# Altium footprint library chipfc_libs.PCBLIB: 315 footprints (part 8 of 20)
Each footprint in its own frame and in the unit in brackets; x right, y up, seen from the top. Pads: shape width x height; smd on the part's side, far side on the other; paste and mask are expansions set on the pad; w line width, h text height; cw(c..) or ccw(c..) is an arc to the next point about the centre after c.
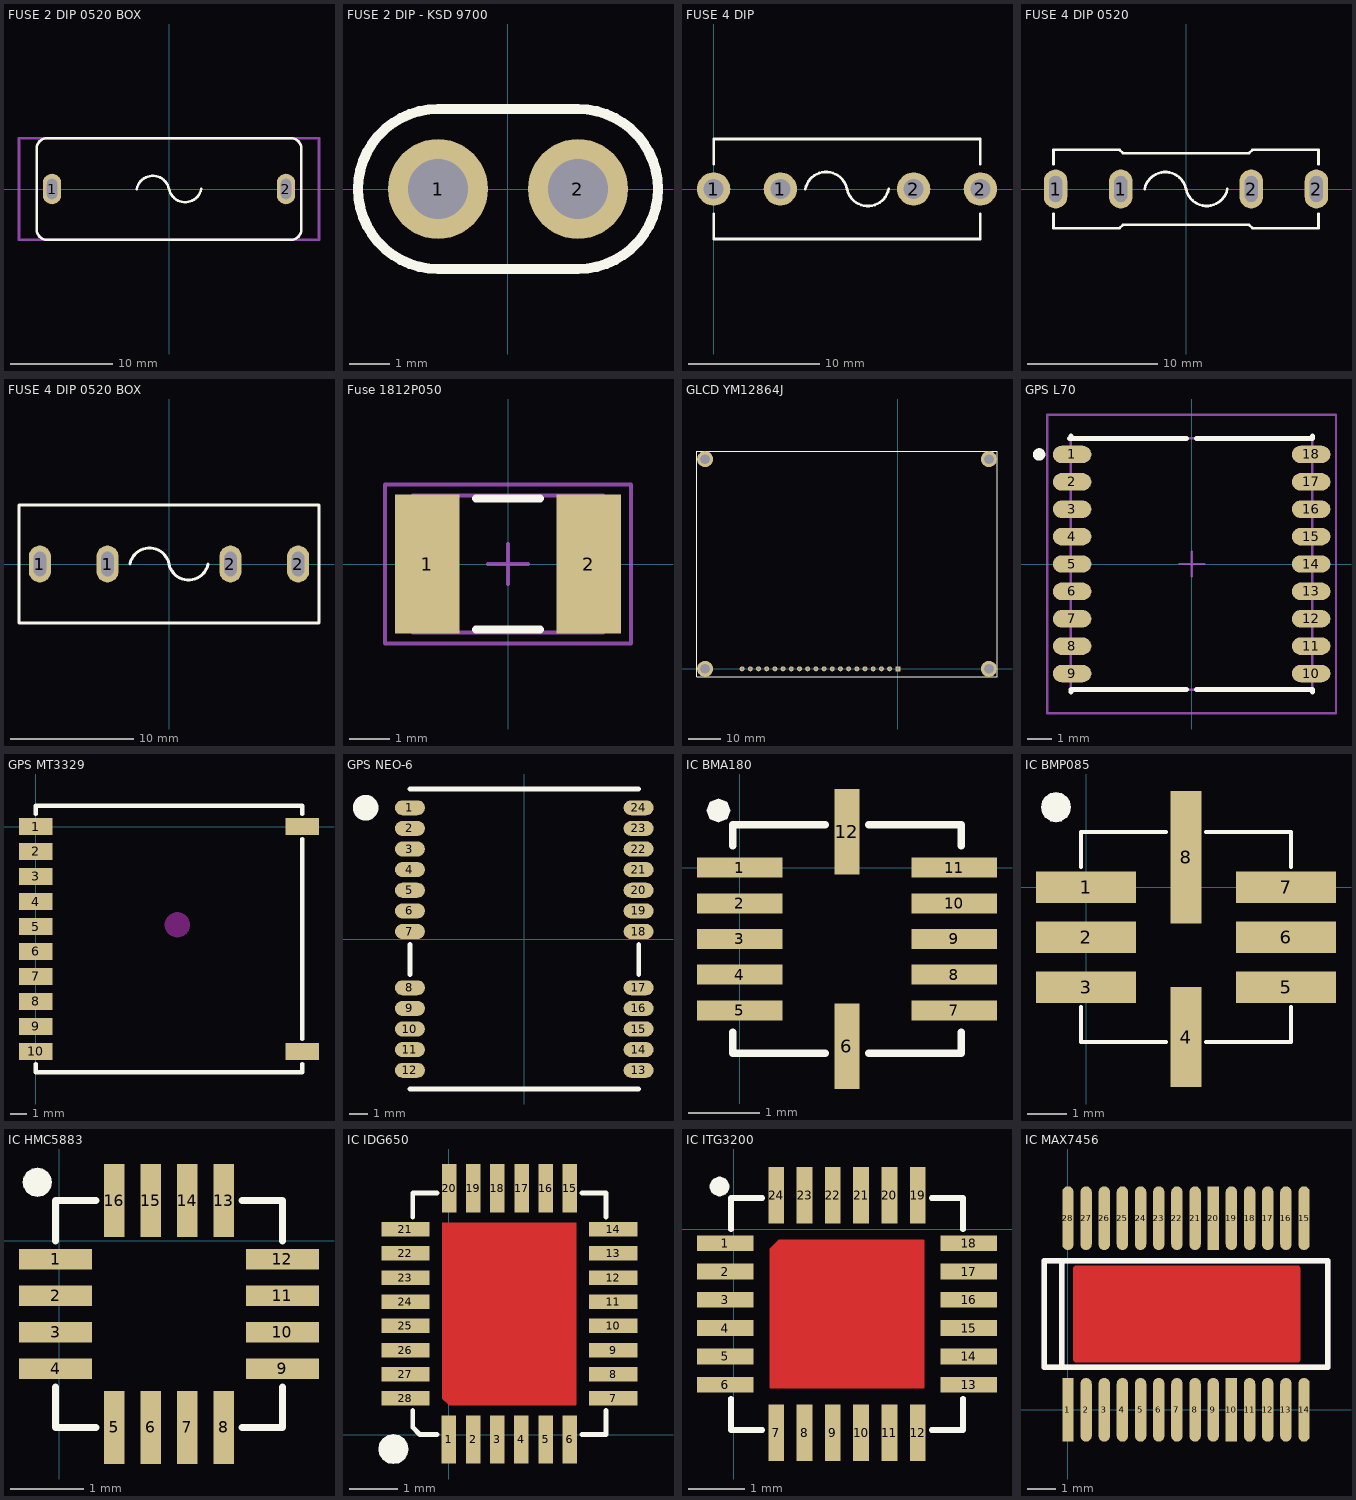
[diagram p7: the footprints below, top view; thin cyan lines are the x and y axes]

## FUSE 2 DIP 0520 BOX [mm] "5mm x 20mm"
pads (2):
  oval 1.8x3 hole 1 slot 2 at 90 deg: 1(-11.5,0) 2(11.5,0)
Top Overlay:
  lines w0.254: -3.175,0 cw(c-1.587,-0.318) 0,0 ccw(c1.587,0.318) 3.175,0 ; -13,-4 ccw(c-12,-4) -12,-5 12,-5 ccw(c12,-4) 13,-4 13,4 ccw(c12,4) 12,5 -12,5 ccw(c-12,4) -13,4 -13,-4
Mechanical 1:
  lines w0.254: -14.75,-5 -14.75,5 14.75,5 14.75,-5 -14.75,-5
3D body "User Library-Fuse_Holder_FH-101-1.STEP": height 10.75, standoff -4.25, extent -12.15,-4.8 12.15,4.8

## FUSE 2 DIP - KSD 9700 [mm]
pads (2):
  round 2.5 hole 1.5: 1(-1.75,0) 2(1.75,0)
Top Overlay:
  lines w0.254: -1.75,-2 cw(c-1.75,0) -1.75,2 1.75,2 cw(c1.75,0) 1.75,-2 -1.75,-2

## FUSE 4 DIP [mil]
pads (4):
  round 100 hole 60: 1(0,0) 1(200,0) 2(600,0) 2(800,0)
Top Overlay:
  lines w8: 0,-75 0,-150 800,-150 800,-75 ; 0,75 0,150 800,150 800,75 ; 275,0 cw(c337.5,-12.5) 400,0 ccw(c462.5,12.5) 525,0
3D body "User Library-Fuse Leg_2009.step": height 377.88, standoff -129.94, extent -15,-121.85 225,121.85
3D body "User Library-Fuse Leg_2009.step": height 377.88, standoff -129.94, extent 575,-121.85 815,121.85
3D body "User Library-Fuse Small 1A.step": height 350.39, standoff 149.61, extent 12.2,-100.79 787.8,100

## FUSE 4 DIP 0520 [mm] "5mm x 20mm"
pads (4):
  oval 1.8x3 hole 1 slot 2 at 90 deg: 1(-10,0) 1(-5,0) 2(5,0) 2(10,0)
Top Overlay:
  lines w0.203: -10.16,-1.905 -10.16,-3 -5.08,-3 -4.83,-2.75 4.83,-2.75 5.08,-3 10.16,-3 10.16,-1.905 ; -10.16,1.905 -10.16,3 -5.08,3 -4.83,2.75 4.83,2.75 5.08,3 10.16,3 10.16,1.905 ; -3.175,0 cw(c-1.587,-0.318) 0,0 ccw(c1.587,0.318) 3.175,0
3D body "User Library-Fuse Small 1A.step": height 8.9, standoff 3.8, extent -9.85,-2.56 9.85,2.54
3D body "User Library-Fuse Leg_2009.step": height 9.6, standoff -3.3, extent 4.445,-3.095 10.541,3.095
3D body "User Library-Fuse Leg_2009.step": height 9.6, standoff -3.3, extent -10.541,-3.095 -4.445,3.095

## FUSE 4 DIP 0520 BOX [mm] "5mm x 20mm"
pads (4):
  oval 1.8x3 hole 1 slot 2 at 90 deg: 1(-10.5,0) 1(-5,0) 2(5,0) 2(10.5,0)
Top Overlay:
  lines w0.254: -3.175,0 cw(c-1.587,-0.318) 0,0 ccw(c1.587,0.318) 3.175,0 ; -12.2,-4.8 12.2,-4.8 12.2,4.8 -12.2,4.8 -12.2,-4.8
3D body "User Library-Fuse_Holder_FH-101-1.STEP": height 10.75, standoff -4.25, extent -12.15,-4.8 12.15,4.8

## Fuse 1812P050 [mm] "Fuse 1812P050, 2-Leads, Body 4.5x3.2mm, IPC Medium Density"
height 0.75
pads (2):
  rect 1.6x3.45 smd: 1(-2,0) 2(2,0)
Top Overlay:
  lines w0.2: -0.8,-1.625 0.8,-1.625 ; -0.8,1.625 0.8,1.625
Mechanical 13:
  lines w0.1: -2.365,-1.705 -2.365,1.705 2.365,1.705 2.365,-1.705 -2.365,-1.705
Mechanical 15:
  lines w0.1: -0.5,0 0.5,0 ; 0,-0.5 0,0.5 ; -3.05,-1.975 -3.05,1.975 3.05,1.975 3.05,-1.975 -3.05,-1.975
3D body "User Library-1812L.step": height 1.34, standoff 0, extent -2.33,-1.7 2.4,1.71

## GLCD YM12864J [mil]
pads (24):
  rect 60x60 / inner round 60 / far side rect 60x80 hole 31: 1(0,0)
  round 60 / inner round 60 / far side oval 60x80 hole 31: 2(-100,0) 3(-200,0) 4(-300,0) 5(-400,0) 6(-500,0) 7(-600,0) 8(-700,0) 9(-800,0) 10(-900,0) 11(-1000,0) 12(-1100,0) 13(-1200,0) 14(-1300,0) 15(-1400,0) 16(-1500,0) 17(-1600,0) 18(-1700,0) 19(-1800,0) 20(-1900,0)
  round 196.83 / inner round 60 / far side round 196.83 hole 118.1: HOLD1(-2352.15,0) HOLD2(-2352.15,2558.83) HOLD3(1112.1,2558.83) HOLD4(1112.1,0)
Top Overlay:
  lines w10: -2450.57,-98.42 1210.52,-98.42 1210.52,2657.25 -2450.57,2657.25 -2450.57,-98.42
  text ".Comment" at -52.33,-118.13 h37.5
  text ".Designator" at -61.45,56.88 h37.5

## GPS L70 [mm] "LCC, 18-Pins, Body 9.7x10.1mm (max), Pitch 1.10mm, IPC Medium Density"
height 2.5
pads (18):
  oval 1.55x0.7 smd: 1(-4.8,4.4) 2(-4.8,3.3) 3(-4.8,2.2) 4(-4.8,1.1) 5(-4.8,0) 6(-4.8,-1.1) 7(-4.8,-2.2) 8(-4.8,-3.3) 9(-4.8,-4.4) 10(4.8,-4.4) 11(4.8,-3.3) 12(4.8,-2.2) 13(4.8,-1.1) 14(4.8,0) 15(4.8,1.1) 16(4.8,2.2) 17(4.8,3.3) 18(4.8,4.4)
Top Overlay:
  circle w0.25: c-6.125,4.4 r0.125
  lines w0.2: -4.85,-5.15 -4.85,-5.05 -0.2,-5.05 ; -4.85,5.15 -4.85,5.1 -4.9,5.05 -0.2,5.05 ; 0.2,-5.05 4.85,-5.05 4.85,-5.15 ; 0.2,5.05 4.85,5.05 4.85,5.15
Mechanical 13:
  lines w0.1: -4.9,5.05 4.85,5.05 4.85,-5.05 -4.85,-5.05 -4.85,5.1 -4.9,5.05
Mechanical 15:
  lines w0.1: -0.5,0 0.5,0 ; 0,-0.5 0,0.5 ; -5.8,-6 -5.8,6 5.8,6 5.8,-6 -5.8,-6
3D body "User Library-QUECTEL L70.step": height 2.52, standoff 0, extent -4.85,-5.05 4.85,5.05

## GPS MT3329 [mm] "66-channel GPS Engine Board Antenna Module with MTK Chipset MEDIATEK-3329"
height 6
pads (13):
  rect 2x1 smd: 1(0,0) 2(0,-1.5) 3(0,-3) 4(0,-4.5) 5(0,-6) 6(0,-7.5) 7(0,-9) 8(0,-10.5) 9(0,-12) 10(0,-13.5) ""(16,-13.5) ""(16,0)
  round 1.524 on Keep-Out: ""(8.5,-5.9)
Top Overlay:
  lines w0.254: 0,-14.25 0,-14.75 16,-14.75 16,-14.25 ; 0,0.75 0,1.25 16,1.25 16,0.75 ; 16,-12.75 16,-0.75
3D body "User Library-GPS.step": height 6.49, standoff -0.01, extent -0.01,-14.75 16.01,1.25

## GPS NEO-6 [mm]
pads (24):
  oval 1.6x0.8 smd: 1(-6.1,7) 2(-6.1,5.9) 3(-6.1,4.8) 4(-6.1,3.7) 5(-6.1,2.6) 6(-6.1,1.5) 7(-6.1,0.4) 8(-6.1,-2.6) 9(-6.1,-3.7) 10(-6.1,-4.8) 11(-6.1,-5.9) 12(-6.1,-7) 13(6.1,-7) 14(6.1,-5.9) 15(6.1,-4.8) 16(6.1,-3.7) 17(6.1,-2.6) 18(6.1,0.4) 19(6.1,1.5) 20(6.1,2.6) 21(6.1,3.7) 22(6.1,4.8) 23(6.1,5.9) 24(6.1,7)
Top Overlay:
  circle w1.016: c-8.465,7 r0.175
  lines w0.254: -6.1,-8 6.1,-8 ; -6.1,-1.9 -6.1,-0.3 ; -6.1,8 6.1,8 ; 6.1,-1.9 6.1,-0.3
3D body "User Library-L20.step": height 3.3, standoff 0, extent -6.104,-8 6.096,8

## IC BMA180 [mil]
pads (12):
  rect 47.23x11 smd: 1(0,0) 2(0,-19.68) 3(0,-39.37) 4(0,-59.05) 5(0,-78.75) 7(118.12,-78.75) 8(118.12,-59.05) 9(118.12,-39.37) 10(118.12,-19.68) 11(118.12,0)
  rect 14x47.23 smd: 6(59.05,-98.43) 12(59.05,19.68)
Top Overlay:
  region: -7.33,36.27 -7.03,35.97 -5.27,31.71 -5.27,31.29 -7.03,27.03 -7.13,26.93 -7.16,26.84 -7.25,26.81 -7.33,26.73 -7.34,26.73 -7.4,26.73 -7.44,26.69 -11.59,24.97 -12.01,24.97 -16.27,26.73 -16.57,27.03 -18.33,31.29 -18.33,31.71 -16.57,35.97 -16.27,36.27 -12.01,38.03 -11.59,38.03
  lines w3.93: -3.93,-90.55 -3.93,-102.37 47.25,-102.37 ; -3.93,11.8 -3.93,23.62 47.25,23.62 ; 70.87,-102.37 122.05,-102.37 122.05,-90.55 ; 70.87,23.62 122.05,23.62 122.05,11.8
Mechanical 1:
  text ".Pattern" at 0,0 h3.51

## IC BMP085 [mil]
pads (8):
  rect 100x31.47 smd: 1(0,0) 2(0,-50) 3(0,-100) 5(200,-100) 6(200,-50) 7(200,0)
  rect 31.47x100 smd: 4(100,-150)
  rect 31.47x132.67 smd: 8(100,30)
Top Overlay:
  region: -24.38,93.85 -24.29,93.79 -24.18,93.77 -19.5,90.65 -19.44,90.56 -19.35,90.5 -16.23,85.82 -16.21,85.71 -16.15,85.62 -15.05,80.11 -15.07,80 -15.05,79.89 -16.15,74.38 -16.21,74.29 -16.23,74.18 -19.35,69.5 -19.4,69.47 -19.42,69.42 -19.57,69.36 -19.62,69.33 -19.64,69.27 -19.69,69.25 -19.72,69.21 -24.18,66.23 -24.29,66.21 -24.38,66.15 -29.89,65.05 -30,65.07 -30.11,65.05 -35.62,66.15 -35.71,66.21 -35.82,66.23 -40.5,69.35 -40.56,69.44 -40.65,69.5 -43.77,74.18 -43.79,74.29 -43.85,74.38 -44.95,79.89 -44.93,80 -44.95,80.11 -43.85,85.62 -43.79,85.71 -43.77,85.82 -40.65,90.5 -40.56,90.56 -40.5,90.65 -35.82,93.77 -35.71,93.79 -35.62,93.85 -30.11,94.95 -30,94.93 -29.89,94.95
  lines w3.93: -5,-120 -5,-155 80,-155 ; -5,20 -5,55 80,55 ; 120,-155 205,-155 205,-120 ; 120,55 205,55 205,20

## IC HMC5883 [mil]
pads (16):
  rect 39.37x11 smd: 1(-1.97,-9.83) 2(-1.97,-29.52) 3(-1.97,-49.22) 4(-1.97,-68.9) 9(120.08,-68.9) 10(120.08,-49.22) 11(120.08,-29.53) 12(120.08,-9.85)
  rect 11x39.37 smd: 5(29.52,-100.4) 6(49.22,-100.4) 7(68.9,-100.4) 8(88.58,-100.4) 13(88.58,21.65) 14(68.9,21.65) 15(49.22,21.65) 16(29.53,21.65)
Top Overlay:
  region: -8.93,38.71 -8.84,38.65 -8.73,38.63 -6.39,37.06 -6.33,36.97 -6.24,36.91 -5.45,35.73 -5.38,35.63 -4.67,34.57 -4.65,34.46 -4.59,34.37 -4.04,31.61 -4.06,31.5 -4.04,31.39 -4.59,28.63 -4.65,28.54 -4.67,28.43 -6.24,26.09 -6.33,26.03 -6.39,25.94 -8.73,24.37 -8.84,24.35 -8.93,24.29 -11.69,23.74 -11.8,23.76 -11.91,23.74 -14.67,24.29 -14.76,24.35 -14.87,24.37 -17.21,25.94 -17.27,26.03 -17.36,26.09 -18.93,28.43 -18.95,28.54 -19.01,28.63 -19.56,31.39 -19.54,31.5 -19.56,31.61 -19.01,34.37 -18.95,34.46 -18.93,34.57 -17.36,36.91 -17.27,36.97 -17.21,37.06 -14.87,38.63 -14.76,38.65 -14.67,38.71 -11.91,39.26 -11.8,39.24 -11.69,39.26
  lines w3.93: -1.97,-78.75 -1.97,-100.4 19.68,-100.4 ; -1.97,0 -1.97,21.65 19.68,21.65 ; 98.43,-100.4 120.08,-100.4 120.08,-78.75 ; 98.43,21.65 120.08,21.65 120.08,0

## IC IDG650 [mm]
pads (28):
  rect 0.3x1 smd: 1(0,-0.1) 2(0.5,-0.1) 3(0.999,-0.1) 4(1.499,-0.1) 5(1.999,-0.1) 6(2.5,-0.1) 15(2.5,5.1) 16(2.001,5.1) 17(1.501,5.1) 18(1.001,5.1) 19(0.501,5.1) 20(0.001,5.1)
  rect 1x0.3 smd: 7(3.4,0.75) 8(3.4,1.249) 9(3.4,1.749) 10(3.4,2.249) 11(3.4,2.749) 12(3.4,3.249) 13(3.4,3.749) 14(3.4,4.249) 21(-0.9,4.25) 22(-0.9,3.75) 23(-0.9,3.25) 24(-0.9,2.75) 25(-0.9,2.25) 26(-0.9,1.75) 27(-0.9,1.25) 28(-0.9,0.75)
Top Layer:
  region: 2.634,4.384 2.638,4.374 2.638,0.625 2.634,0.615 2.625,0.611 0,0.611 -0.01,0.615 -0.135,0.74 -0.139,0.75 -0.139,4.374 -0.135,4.384 -0.125,4.388 2.625,4.388
Top Overlay:
  region: -1.042,-0.011 -1.033,-0.016 -1.022,-0.019 -0.939,-0.074 -0.933,-0.083 -0.924,-0.089 -0.869,-0.172 -0.867,-0.182 -0.861,-0.191 -0.842,-0.289 -0.844,-0.299 -0.842,-0.31 -0.861,-0.407 -0.867,-0.416 -0.869,-0.427 -0.905,-0.48 -0.906,-0.481 -0.906,-0.483 -0.907,-0.483 -0.907,-0.484 -0.924,-0.51 -0.933,-0.516 -0.939,-0.525 -1.022,-0.58 -1.033,-0.582 -1.042,-0.588 -1.139,-0.608 -1.15,-0.605 -1.16,-0.608 -1.258,-0.588 -1.267,-0.582 -1.277,-0.58 -1.36,-0.525 -1.366,-0.516 -1.375,-0.51 -1.43,-0.427 -1.433,-0.416 -1.439,-0.407 -1.458,-0.31 -1.456,-0.299 -1.458,-0.289 -1.439,-0.191 -1.433,-0.182 -1.43,-0.172 -1.375,-0.089 -1.366,-0.083 -1.36,-0.074 -1.277,-0.019 -1.267,-0.016 -1.258,-0.011 -1.16,0.009 -1.15,0.007 -1.139,0.009
  lines w0.1: -0.75,0.5 -0.75,0.15 -0.6,0 -0.25,0 ; -0.75,4.5 -0.75,5 -0.25,5 ; 2.75,0 3.25,0 3.25,0.5 ; 2.75,5 3.25,5 3.25,4.5
Top Solder:
  region: 2.634,4.384 2.638,4.374 2.638,0.625 2.634,0.615 2.625,0.611 0,0.611 -0.01,0.615 -0.135,0.74 -0.139,0.75 -0.139,4.374 -0.135,4.384 -0.125,4.388 2.625,4.388
Mechanical 1:
  text ".Pattern" at 0,0 h0.36

## IC ITG3200 [mil]
pads (24):
  rect 39.37x11 smd: 1(-5.9,-9.83) 2(-5.9,-29.52) 3(-5.9,-49.2) 4(-5.9,-68.9) 5(-5.9,-88.58) 6(-5.9,-108.27) 13(163.4,-108.27) 14(163.4,-88.58) 15(163.4,-68.9) 16(163.4,-49.22) 17(163.4,-29.53) 18(163.4,-9.85)
  rect 11x39.37 smd: 7(29.52,-141.75) 8(49.22,-141.75) 9(68.9,-141.75) 10(88.58,-141.75) 11(108.27,-141.75) 12(127.95,-141.75) 19(127.97,23.62) 20(108.27,23.62) 21(88.58,23.62) 22(68.9,23.62) 23(49.22,23.62) 24(29.53,23.62)
Top Layer:
  region: 132.28,-7.48 132.44,-7.87 132.44,-110.25 132.28,-110.63 131.9,-110.79 25.58,-110.79 25.2,-110.63 25.04,-110.25 25.04,-13.77 25.12,-13.58 25.2,-13.38 31.12,-7.48 31.28,-7.42 31.5,-7.33 131.9,-7.33
Top Overlay:
  region: -5.65,34.85 -5.08,34.27 -4.5,33.7 -3.11,30.33 -3.11,29.52 -3.11,28.7 -3.92,26.73 -3.95,26.7 -3.95,26.66 -4.5,25.34 -5.08,24.76 -5.65,24.18 -9.02,22.79 -9.83,22.79 -10.65,22.79 -14.01,24.18 -14.59,24.76 -15.17,25.34 -16.56,28.7 -16.56,29.52 -16.56,30.33 -15.17,33.7 -14.59,34.27 -14.01,34.85 -10.65,36.24 -9.83,36.24 -9.02,36.24
  lines w3.93: -1.97,-118.12 -1.97,-139.77 19.68,-139.77 ; -1.97,0 -1.97,21.65 19.68,21.65 ; 137.8,-139.77 159.47,-139.77 159.47,-118.12 ; 137.8,21.65 159.47,21.65 159.47,0
Top Solder:
  region: 132.28,-7.48 132.44,-7.87 132.44,-110.25 132.28,-110.63 131.9,-110.79 25.58,-110.79 25.2,-110.63 25.04,-110.25 25.04,-13.77 25.12,-13.58 25.2,-13.38 31.12,-7.48 31.28,-7.42 31.5,-7.33 131.9,-7.33

## IC MAX7456 [mil]
pads (28):
  rect 16x90 smd: 1(0,0) 10(230.4,0) 20(204.8,270)
  oval 16x90 smd: 2(25.6,0) 3(51.2,0) 4(76.8,0) 5(102.4,0) 6(128,0) 7(153.6,0) 8(179.2,0) 9(204.8,0) 11(256,0) 12(281.6,0) 13(307.2,0) 14(332.8,0) 15(332.8,270) 16(307.2,270) 17(281.6,270) 18(256,270) 19(230.4,270) 21(179.2,270) 22(153.6,270) 23(128,270) 24(102.4,270) 25(76.8,270) 26(51.2,270) 27(25.6,270) 28(0,270)
Top Layer:
  region: 326.91,201.91 327.71,200 327.71,70 326.91,68.09 325,67.29 10,67.29 8.09,68.09 7.29,70 7.29,200 8.09,201.91 10,202.71 325,202.71
Top Overlay:
  lines w8: -8.6,60 -8.6,210 ; -33.6,60 -33.6,210 366.4,210 366.4,60 -33.6,60
Top Solder:
  region: 326.91,201.91 327.71,200 327.71,70 326.91,68.09 325,67.29 10,67.29 8.09,68.09 7.29,70 7.29,200 8.09,201.91 10,202.71 325,202.71
Mechanical 1:
  lines w8: -8.6,60 -8.6,210 ; -33.6,60 -33.6,210 366.4,210 366.4,60 -33.6,60
Mechanical 3:
  lines w4: 153.9,135 cw(c166.4,135) 166.4,147.5 cw(c166.4,135) 178.9,135 cw(c166.4,135) 166.4,122.5 cw(c166.4,135) 153.9,135